# Altium schematic symbol library 2020-12-03_18-34-49.SchLib: 2 symbols
Pins are listed as number, name and electrical type; pins without a type are passive.

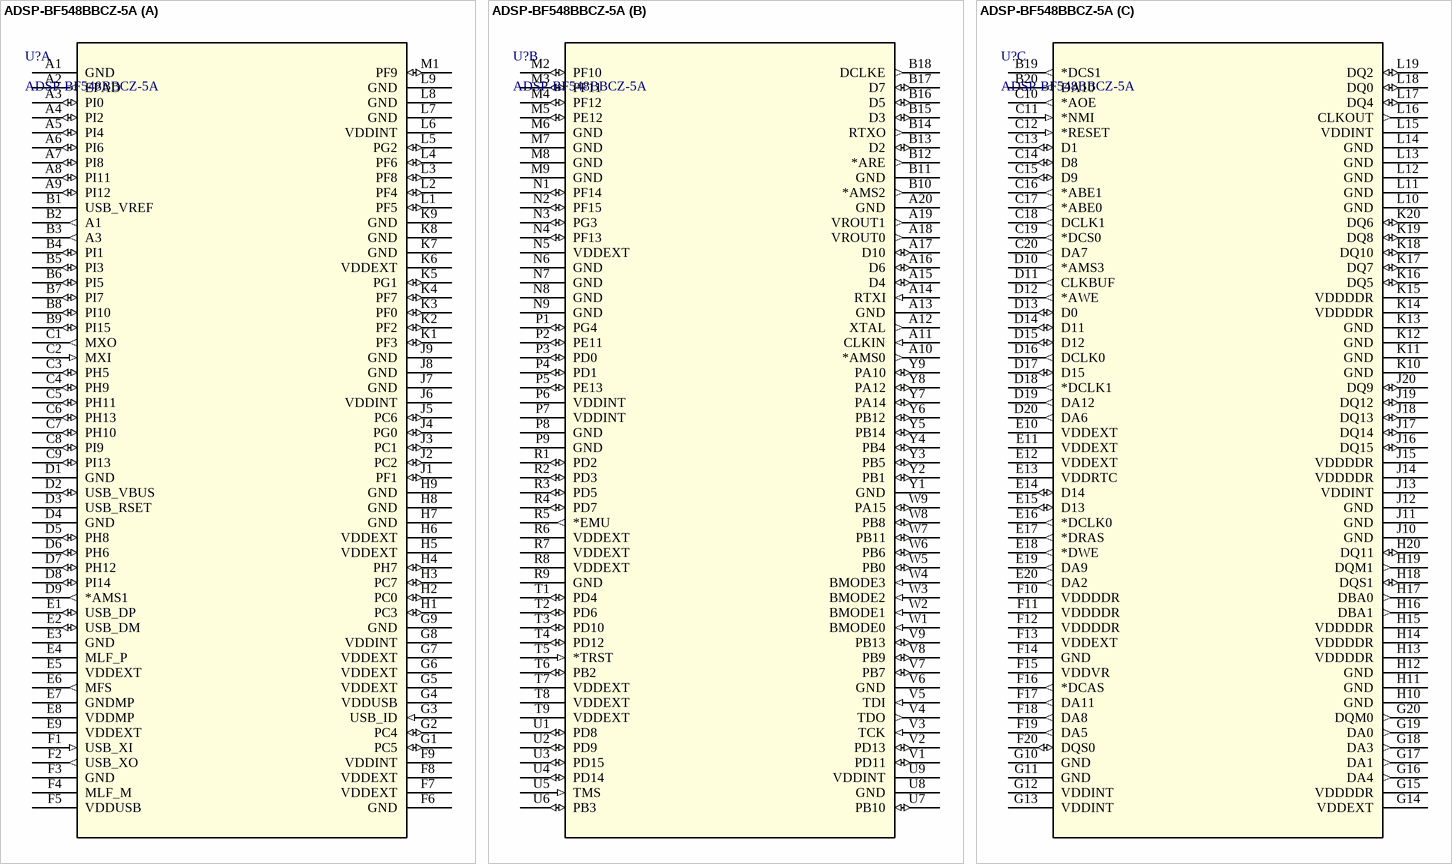
[diagram p0: symbol ADSP-BF548BBCZ-5A]

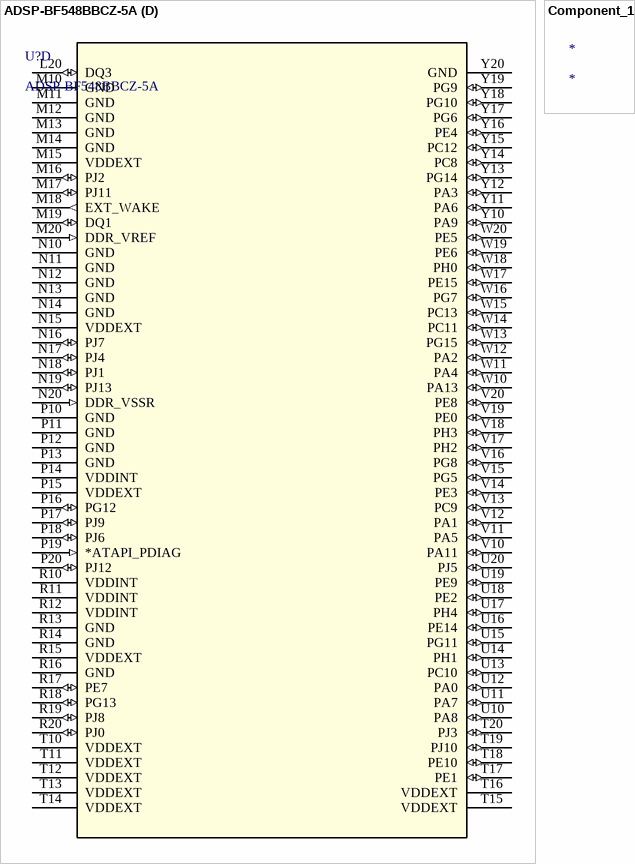
[diagram p1: symbols ADSP-BF548BBCZ-5A to Component_1]

## ADSP-BF548BBCZ-5A
designator U?
No Description Available; Vendor: Analog Devices Inc; Built_By: EMA_UL_Team; SourceLibrary: Analog_2015-01-06; Manufacturer_Part_Number: ADSP-BF548BBCZ-5A; Copyright: Copyright (C) 2018 Accelerated Designs. All rights reserved; RefDes: RefDes; Type: DEV
footprint BC_400_1_ADI
part A pins: A1 GND (power), A2 EPAD (out), A3 PI0 (io), A4 PI2 (io), A5 PI4 (io), A6 PI6 (io), A7 PI8 (io), A8 PI11 (io), A9 PI12 (io), B1 USB_VREF, B2 A1 (out), B3 A3 (out), B4 PI1 (io), B5 PI3 (io), B6 PI5 (io), B7 PI7 (io), B8 PI10 (io), B9 PI15 (io), C1 MXO (out), C2 MXI (in), C3 PH5 (io), C4 PH9 (io), C5 PH11 (io), C6 PH13 (io), C7 PH10 (io), C8 PI9 (io), C9 PI13 (io), D1 GND (power), D2 USB_VBUS (io), D3 USB_RSET, D4 GND (power), D5 PH8 (io), D6 PH6 (io), D7 PH12 (io), D8 PI14 (io), D9 *AMS1 (out), E1 USB_DP (io), E2 USB_DM (io), E3 GND (power), E4 MLF_P, E5 VDDEXT (power), E6 MFS (out), E7 GNDMP (power), E8 VDDMP (power), E9 VDDEXT (power), F1 USB_XI (in), F2 USB_XO (out), F3 GND (power), F4 MLF_M, F5 VDDUSB (power), F6 GND (power), F7 VDDEXT (power), F8 VDDEXT (power), F9 VDDINT (power), G1 PC5 (io), G2 PC4 (io), G3 USB_ID (in), G4 VDDUSB (power), G5 VDDEXT (power), G6 VDDEXT (power), G7 VDDEXT (power), G8 VDDINT (power), G9 GND (power), H1 PC3 (io), H2 PC0 (io), H3 PC7 (io), H4 PH7 (io), H5 VDDEXT (power), H6 VDDEXT (power), H7 GND (power), H8 GND (power), H9 GND (power), J1 PF1 (io), J2 PC2 (io), J3 PC1 (io), J4 PG0 (io), J5 PC6 (io), J6 VDDINT (power), J7 GND (power), J8 GND (power), J9 GND (power), K1 PF3 (io), K2 PF2 (io), K3 PF0 (io), K4 PF7 (io), K5 PG1 (io), K6 VDDEXT (power), K7 GND (power), K8 GND (power), K9 GND (power), L1 PF5 (io), L2 PF4 (io), L3 PF8 (io), L4 PF6 (io), L5 PG2 (io), L6 VDDINT (power), L7 GND (power), L8 GND (power), L9 GND (power), M1 PF9 (io)
part B pins: A10 *AMS0 (out), A11 CLKIN (in), A12 XTAL (out), A13 GND (power), A14 RTXI (in), A15 D4 (io), A16 D6 (io), A17 D10 (io), A18 VROUT0 (out), A19 VROUT1 (out), A20 GND (power), B10 *AMS2 (out), B11 GND (power), B12 *ARE (out), B13 D2 (io), B14 RTXO (out), B15 D3 (io), B16 D5 (io), B17 D7 (io), B18 DCLKE (out), M2 PF10 (io), M3 PF11 (io), M4 PF12 (io), M5 PE12 (io), M6 GND (power), M7 GND (power), M8 GND (power), M9 GND (power), N1 PF14 (io), N2 PF15 (io), N3 PG3 (io), N4 PF13 (io), N5 VDDEXT (power), N6 GND (power), N7 GND (power), N8 GND (power), N9 GND (power), P1 PG4 (io), P2 PE11 (io), P3 PD0 (io), P4 PD1 (io), P5 PE13 (io), P6 VDDINT (power), P7 VDDINT (power), P8 GND (power), P9 GND (power), R1 PD2 (io), R2 PD3 (io), R3 PD5 (io), R4 PD7 (io), R5 *EMU (out), R6 VDDEXT (power), R7 VDDEXT (power), R8 VDDEXT (power), R9 GND (power), T1 PD4 (io), T2 PD6 (io), T3 PD10 (io), T4 PD12 (io), T5 *TRST (in), T6 PB2 (io), T7 VDDEXT (power), T8 VDDEXT (power), T9 VDDEXT (power), U1 PD8 (io), U2 PD9 (io), U3 PD15 (io), U4 PD14 (io), U5 TMS (in), U6 PB3 (io), U7 PB10 (io), U8 GND (power), U9 VDDINT (power), V1 PD11 (io), V2 PD13 (io), V3 TCK (in), V4 TDO (out), V5 TDI (in), V6 GND (power), V7 PB7 (io), V8 PB9 (io), V9 PB13 (io), W1 BMODE0 (in), W2 BMODE1 (in), W3 BMODE2 (in), W4 BMODE3 (in), W5 PB0 (io), W6 PB6 (io), W7 PB11 (io), W8 PB8 (io), W9 PA15 (io), Y1 GND (power), Y2 PB1 (io), Y3 PB5 (io), Y4 PB4 (io), Y5 PB14 (io), Y6 PB12 (io), Y7 PA14 (io), Y8 PA12 (io), Y9 PA10 (io)
part C pins: B19 *DCS1 (out), B20 DA10 (out), C10 *AOE (out), C11 *NMI (in), C12 *RESET (in), C13 D1 (io), C14 D8 (io), C15 D9 (io), C16 *ABE1 (out), C17 *ABE0 (out), C18 DCLK1 (out), C19 *DCS0 (out), C20 DA7 (out), D10 *AMS3 (out), D11 CLKBUF (out), D12 *AWE (out), D13 D0 (io), D14 D11 (io), D15 D12 (io), D16 DCLK0 (out), D17 D15 (io), D18 *DCLK1 (out), D19 DA12 (out), D20 DA6 (out), E10 VDDEXT (power), E11 VDDEXT (power), E12 VDDEXT (power), E13 VDDRTC (power), E14 D14 (io), E15 D13 (io), E16 *DCLK0 (out), E17 *DRAS (out), E18 *DWE (out), E19 DA9 (out), E20 DA2 (out), F10 VDDDDR (power), F11 VDDDDR (power), F12 VDDDDR (power), F13 VDDEXT (power), F14 GND (power), F15 VDDVR (power), F16 *DCAS (out), F17 DA11 (out), F18 DA8 (out), F19 DA5 (out), F20 DQS0 (io), G10 GND (power), G11 GND (power), G12 VDDINT (power), G13 VDDINT (power), G14 VDDEXT (power), G15 VDDDDR (power), G16 DA4 (out), G17 DA1 (out), G18 DA3 (out), G19 DA0 (out), G20 DQM0 (out), H10 GND (power), H11 GND (power), H12 GND (power), H13 VDDDDR (power), H14 VDDDDR (power), H15 VDDDDR (power), H16 DBA1 (out), H17 DBA0 (out), H18 DQS1 (io), H19 DQM1 (out), H20 DQ11 (io), J10 GND (power), J11 GND (power), J12 GND (power), J13 VDDINT (power), J14 VDDDDR (power), J15 VDDDDR (power), J16 DQ15 (io), J17 DQ14 (io), J18 DQ13 (io), J19 DQ12 (io), J20 DQ9 (io), K10 GND (power), K11 GND (power), K12 GND (power), K13 GND (power), K14 VDDDDR (power), K15 VDDDDR (power), K16 DQ5 (io), K17 DQ7 (io), K18 DQ10 (io), K19 DQ8 (io), K20 DQ6 (io), L10 GND (power), L11 GND (power), L12 GND (power), L13 GND (power), L14 GND (power), L15 VDDINT (power), L16 CLKOUT (out), L17 DQ4 (io), L18 DQ0 (io), L19 DQ2 (io)
part D pins: L20 DQ3 (io), M10 GND (power), M11 GND (power), M12 GND (power), M13 GND (power), M14 GND (power), M15 VDDEXT (power), M16 PJ2 (io), M17 PJ11 (io), M18 EXT_WAKE (out), M19 DQ1 (io), M20 DDR_VREF (in), N10 GND (power), N11 GND (power), N12 GND (power), N13 GND (power), N14 GND (power), N15 VDDEXT (power), N16 PJ7 (io), N17 PJ4 (io), N18 PJ1 (io), N19 PJ13 (io), N20 DDR_VSSR (in), P10 GND (power), P11 GND (power), P12 GND (power), P13 GND (power), P14 VDDINT (power), P15 VDDEXT (power), P16 PG12 (io), P17 PJ9 (io), P18 PJ6 (io), P19 *ATAPI_PDIAG (in), P20 PJ12 (io), R10 VDDINT (power), R11 VDDINT (power), R12 VDDINT (power), R13 GND (power), R14 GND (power), R15 VDDEXT (power), R16 GND (power), R17 PE7 (io), R18 PG13 (io), R19 PJ8 (io), R20 PJ0 (io), T10 VDDEXT (power), T11 VDDEXT (power), T12 VDDEXT (power), T13 VDDEXT (power), T14 VDDEXT (power), T15 VDDEXT (power), T16 VDDEXT (power), T17 PE1 (io), T18 PE10 (io), T19 PJ10 (io), T20 PJ3 (io), U10 PA8 (io), U11 PA7 (io), U12 PA0 (io), U13 PC10 (io), U14 PH1 (io), U15 PG11 (io), U16 PE14 (io), U17 PH4 (io), U18 PE2 (io), U19 PE9 (io), U20 PJ5 (io), V10 PA11 (io), V11 PA5 (io), V12 PA1 (io), V13 PC9 (io), V14 PE3 (io), V15 PG5 (io), V16 PG8 (io), V17 PH2 (io), V18 PH3 (io), V19 PE0 (io), V20 PE8 (io), W10 PA13 (io), W11 PA4 (io), W12 PA2 (io), W13 PG15 (io), W14 PC11 (io), W15 PC13 (io), W16 PG7 (io), W17 PE15 (io), W18 PH0 (io), W19 PE6 (io), W20 PE5 (io), Y10 PA9 (io), Y11 PA6 (io), Y12 PA3 (io), Y13 PG14 (io), Y14 PC8 (io), Y15 PC12 (io), Y16 PE4 (io), Y17 PG6 (io), Y18 PG10 (io), Y19 PG9 (io), Y20 GND (power)

## Component_1
designator *